# Altium footprint library CustomCase.PcbLib: 411 footprints (part 24 of 26)
Each footprint in its own frame and in the unit in brackets; x right, y up, seen from the top. Pads: shape width x height; smd on the part's side, far side on the other; paste and mask are expansions set on the pad; w line width, h text height; cw(c..) or ccw(c..) is an arc to the next point about the centre after c.
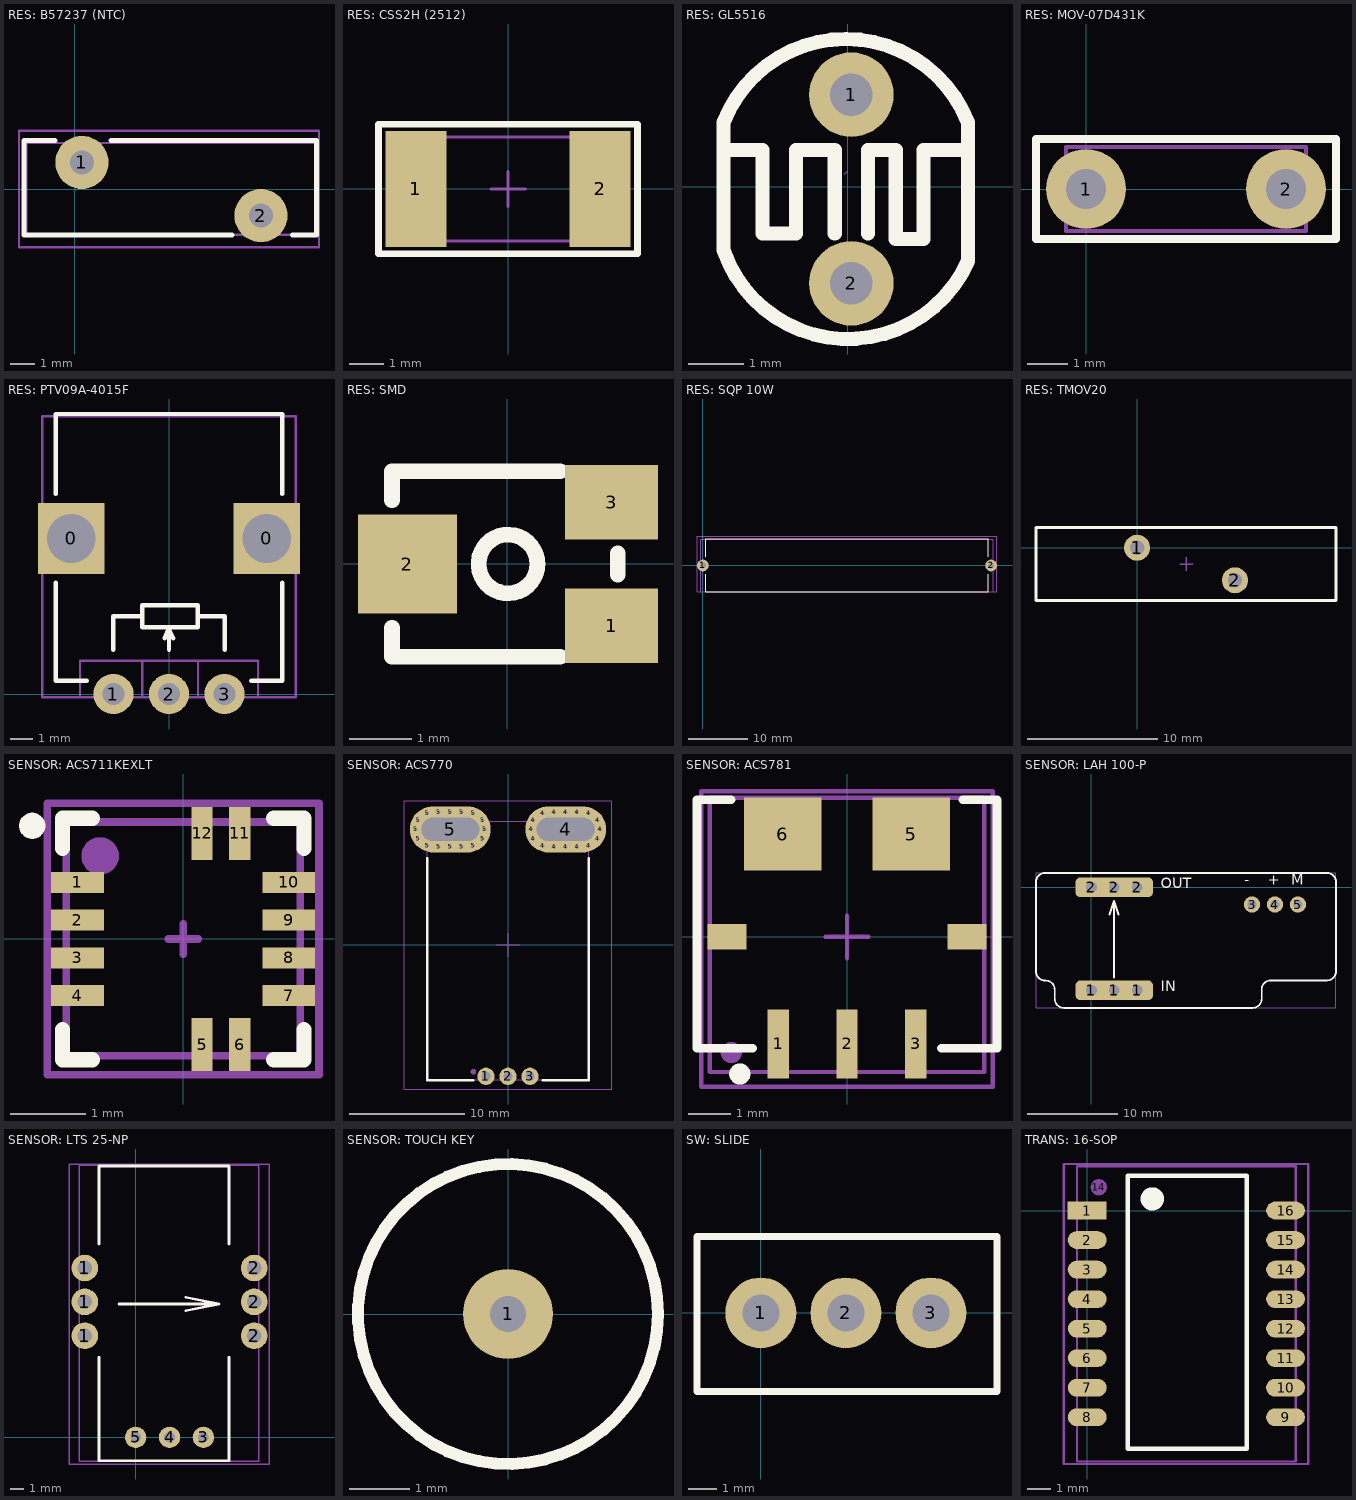
[diagram p23: the footprints below, top view; thin cyan lines are the x and y axes]

## RES: B57237 (NTC) [mm]
pads (2):
  round 2.2 hole 1: 1(0.3,1.1) 2(7.7,-1.1)
Top Overlay:
  lines w0.2: -0.8,2 -2.1,2 -2.1,-1.9 6.5,-1.9 ; 1.5,2 10,2 10,-1.9 9,-1.9
Top Assy:
  lines w0.1: -2,-1.9 10,-1.9 10,1.902 -2,1.902 -2,-1.9
Size Area:
  lines w0.1: -2.3,-2.4 -2.3,2.4 10.1,2.4 10.1,-2.4 -2.3,-2.4
3D body "User Library-S10K275.STEP": height 13, standoff -2.5, extent -2,-1.9 10,1.902

## RES: CSS2H (2512) [mm]
pads (2):
  rect 1.8x3.4 smd: 1(-2.7,0) 2(2.7,0)
Top Overlay:
  lines w0.2: -3.8,-1.9 3.8,-1.9 3.8,1.9 -3.8,1.9 -3.8,-1.9
Top Assy:
  lines w0.1: -3.175,-1.525 -3.175,1.525 3.175,1.525 3.175,-1.525 -3.175,-1.525
Size Area:
  lines w0.1: -0.5,0 0.5,0 ; 0,-0.5 0,0.5 ; -3.85,-1.9 -3.85,1.9 3.85,1.9 3.85,-1.9 -3.85,-1.9
3D body "CSS2H-2512.STEP": height 0.83, standoff 0, extent -3.175,-1.525 3.175,1.525

## RES: GL5516 [mil]
pads (2):
  round 60 hole 30: 1(2.44,65.44) 2(2.44,-68.42)
Top Overlay:
  lines w10: -88.16,-44.76 ccw(c0.04,-14.69) 85.14,-52.66 ; -88.16,45.74 cw(c-1.51,11.84) 85.14,45.74 ; -88.11,-44.8 -88.11,45.75 ; -88.11,26.07 -60.55,26.07 -60.55,-32.99 -36.93,-32.99 -36.93,26.07 -9.37,26.07 -9.37,-32.99 ; 14.25,-32.99 14.25,26.07 33.94,26.07 33.94,-36.93 53.62,-36.93 53.62,26.07 85.12,26.07 ; 85.12,-52.67 85.12,45.75
Size Area:
  lines w0.1: -2.5,9.03 -0.5,11.03

## RES: MOV-07D431K [mm]
pads (2):
  round 2 hole 1: 1(0,0) 2(5,0)
Top Overlay:
  lines w0.2: -1.25,-1.25 6.25,-1.25 6.25,1.25 -1.25,1.25 -1.25,-1.25
Top Assy:
  lines w0.1: -0.5,-1.05 5.5,-1.05 5.5,1.05 -0.5,1.05 -0.5,-1.05
Size Area:
  lines w0.1: -1.25,-1.25 -1.25,1.25 6.25,1.25 6.25,-1.25 -1.25,-1.25
3D body "User Library-Disc_CAP d6x3_5_5mm.STEP": height 8.1, standoff -2.02, extent -0.5,-1.05 5.5,1.05

## RES: PTV09A-4015F [mm]
pads (5):
  rect 3x3.2 hole 2.2 square: 0(-4.4,7) 0(4.4,7)
  round 1.8 hole 1: 1(-2.5,0) 2(0,0) 3(2.5,0)
Top Overlay:
  lines w0.2: -5.1,5 -5.1,0.6 -3.7,0.6 ; -5.1,9 -5.1,12.6 5.1,12.6 5.1,9 ; -2.5,2 -2.5,3.5 -1.2,3.5 ; -0.2,2.5 0,3 0,2 ; 0,2.9 0.2,2.5 ; 1.3,3.5 2.5,3.5 2.5,2 ; 3.7,0.6 5.1,0.6 5.1,5 ; -1.2,3.5 -1.2,3 1.3,3 1.3,4 -1.2,4 -1.2,3.5
Top Assy:
  lines w0.1: -4,-0.15 -4,1.5 4,1.5 4,-0.15 ; -2.5,2 -2.5,3.5 -1.2,3.5 ; -1.2,-0.15 -1.2,1.5 ; -0.2,2.5 0,3 ; 0,2 0,3 ; 0.2,2.5 0,3 ; 1.3,-0.15 1.3,1.5 ; 1.3,3.5 2.5,3.5 2.5,2 ; -1.2,3.5 -1.2,3 1.3,3 1.3,4 -1.2,4 -1.2,3.5 ; -5.7,-0.15 -5.7,12.5 5.7,12.5 5.7,-0.15 -5.7,-0.15
3D body "6666.STEP": height 15.05, standoff -3.94, extent -5.7,-0.15 5.7,12.5

## RES: SMD [mm]
pads (3):
  rect 1.5x1.2 smd: 1(1.685,-1.001) 3(1.685,0.999)
  rect 1.6x1.6 smd: 2(-1.615,-0.001)
Top Overlay:
  circle w0.254: c0.01,-0.001 r0.475
  lines w0.254: -0.065,1.499 -1.865,1.499 ; 0.854,-1.501 -0.065,-1.501 -1.865,-1.501 ; 0.854,1.499 -1.865,1.499 ; 1.785,-0.17 1.785,0.168 ; -1.865,-1.501 -1.865,-1.032 ; -1.865,-1.501 -1.865,-1.032 ; -1.865,-1.501 -1.865,-1.032 ; -1.865,1.03 -1.865,1.499 ; -1.865,1.03 -1.865,1.499 ; -1.865,1.03 -1.865,1.499
Size Area:
  circle w0.2: c2.135,-1.201 r0.1
3D body "3364w-1-101e.stp": height 1.01, standoff -0.03, extent -2.26,-1.901 2.24,1.899

## RES: SQP 10W [mm]
pads (2):
  round 2 hole 1: 1(0,0) 2(49,0)
Top Overlay:
  lines w0.2: 0.5,-1.5 0.5,-4.5 48.5,-4.5 48.5,-1.5 ; 0.5,1.5 0.5,4.5 48.5,4.5 48.5,1.5
Top Assy:
  lines w0.1: -0.4,4.4 -0.4,-4.5 49.4,-4.5 49.4,4.5 -0.4,4.5
Size Area:
  lines w0.1: -1,-4.5 -1,5 50,5 50,-4.5 -1,-4.5
3D body "User Library-SQP10AJB-1R8.STEP": height 10.55, standoff -4.04, extent -0.4,-4.5 49.4,4.5

## RES: TMOV20 [mm]
pads (2):
  round 2 hole 1.1: 1(0,0) 2(7.5,-2.5)
Top Overlay:
  lines w0.2: -7.75,-4.05 15.246,-4.05 15.246,1.55 -7.75,1.55 -7.75,-4.05
Top Assy:
  lines w0.1: -7.75,-4.05 15.246,-4.05 15.246,1.55 -7.75,1.55 -7.75,-4.05
Size Area:
  lines w0.1: 3.25,-1.25 4.25,-1.25 ; 3.75,-1.75 3.75,-0.75 ; -7.75,-4.05 15.246,-4.05 15.246,1.55 -7.75,1.55 -7.75,-4.05
3D body "User Library-Varistor 20mm.STEP": height 26.7, standoff -2.8, extent -7.75,-4.05 15.246,1.55

## SENSOR: ACS711KEXLT [mm]
pads (14):
  rect 0.7x0.28 smd: 1(-1.4,0.75) 2(-1.4,0.25) 3(-1.4,-0.25) 4(-1.4,-0.75) 7(1.4,-0.75) 8(1.4,-0.25) 9(1.4,0.25) 10(1.4,0.75)
  rect 0.28x0.7 smd: 5(0.25,-1.4) 6(0.75,-1.4) 11(0.75,1.4) 12(0.25,1.4)
  round 0.35 on Top Overlay: ""(-2,1.5)
  round 0.5 on Mech1: ""(-1.1,1.1)
Top Overlay:
  lines w0.2: -1.6,-1.2 -1.6,-1.6 -1.2,-1.6 ; -1.6,1.2 -1.6,1.6 -1.2,1.6 ; 1.2,-1.6 1.6,-1.6 1.6,-1.2 ; 1.2,1.6 1.6,1.6 1.6,1.2
Top Assy:
  lines w0.1: -1.55,-1.55 1.55,-1.55 1.55,1.55 -1.55,1.55 -1.55,-1.55
Size Area:
  lines w0.1: -0.2,0 0.2,0 ; 0,-0.2 0,0.2 ; -1.8,-1.8 -1.8,1.8 1.8,1.8 1.8,-1.8 -1.8,-1.8
3D body "User Library-QFN-16.STEP": height 0.9, standoff 0, extent -1.501,-1.501 1.501,1.501

## SENSOR: ACS770 [mm]
pads (38):
  round 1.5 hole 0.8: 1(-1.91,-11.4) 2(0,-11.4) 3(1.91,-11.4)
  round 0.5 on Mech1: 4(-3,-11)
  round 0.7 hole 0.3: 4(2,10) 4(2.2,9.2) 4(2.2,10.8) 4(3,8.6) 4(3,11.4) 4(4,8.5) 4(4,11.5) 4(5,8.5) 4(5,11.5) 4(6,8.5) 4(6,11.5) 4(7,8.6) 4(7,11.4) 4(7.8,9.2) 4(7.8,10.8) 4(8,10) 5(-8,10) 5(-7.8,9.2) 5(-7.8,10.8) 5(-7,8.6) 5(-7,11.4) 5(-6,8.5) 5(-6,11.5) 5(-5,8.5) 5(-5,11.5) 5(-4,8.5) 5(-4,11.5) 5(-3,8.6) 5(-3,11.4) 5(-2.2,9.2) 5(-2.2,10.8) 5(-2,10)
  oval 7x4 hole 2 slot 5 at 0 deg: 4(5,10) 5(-5,10)
Top Overlay:
  lines w0.2: -7,7.5 -7,-11.75 -3,-11.75 ; 3,-11.75 7,-11.75 7,7.5
Top Assy:
  lines w0.1: -7,-11.705 7,-11.705 7,10.705 -7,10.705 -7,-11.705
Size Area:
  lines w0.1: -1,0 1,0 ; 0,-1 0,1 ; -9,-12.5 9,-12.5 ; -9,-12.5 9,-12.5 ; -9,-12.5 -9,12.5 9,12.5 9,-12.5
3D body "User Library-ACS758xCB-PFF.STEP": height 7.5, standoff -2.98, extent -7,-11.705 7,10.705

## SENSOR: ACS781 [mm]
pads (9):
  rect 0.5x1.6 smd: 1(-1.6,-2.5) 2(0,-2.5) 3(1.6,-2.5)
  rect 1.8x1.7 smd: 5(1.5,2.4) 6(-1.5,2.4)
  rect 0.9x0.6 smd: ""(-2.8,0) ""(2.8,0)
  round 0.5 on Mech1: ""(-2.7,-2.7)
  round 0.5 on Top Overlay: ""(-2.5,-3.2)
Top Overlay:
  lines w0.2: -2.7,3.2 -3.5,3.2 -3.5,-2.6 -2.2,-2.6 ; 2.2,-2.6 3.5,-2.6 3.5,3.2 2.7,3.2
Top Assy:
  lines w0.1: -3.2,-3.154 3.2,-3.154 3.2,3.246 -3.2,3.246 -3.2,-3.154
Size Area:
  lines w0.1: -0.5,0 0.5,0 ; 0,-0.5 0,0.5 ; -3.4,-3.5 -3.4,3.4 3.4,3.4 3.4,-3.5 -3.4,-3.5
3D body "User Library-7-Pin PSOF Package.STEP": height 1.46, standoff -0.02, extent -3.2,-3.154 3.2,3.246

## SENSOR: LAH 100-P [mm]
pads (9):
  rrect50% 3.5x2.2 hole 1.2 square: 1(0,-11.4) 1(2.54,-11.4) 1(5.08,-11.4) 2(0,0) 2(2.54,0) 2(5.08,0)
  round 1.8 hole 1: 3(17.78,-1.905) 4(20.32,-1.905) 5(22.86,-1.905)
Top Overlay:
  lines w0.2: -6.125,0.595 cw(c-5.125,0.595) -5.125,1.595 26.075,1.595 cw(c26.075,0.595) 27.075,0.595 27.075,-9.302 ; -6.125,0.6 -6.125,-9.325 ccw(c-5.125,-9.325) -5.125,-10.325 -5.05,-10.325 cw(c-5.05,-11.325) -4.05,-11.325 -4.05,-12.345 ccw(c-3.05,-12.345) -3.05,-13.345 17.85,-13.345 ccw(c17.85,-12.345) 18.85,-12.345 18.85,-11.3 cw(c19.85,-11.3) 19.85,-10.3 26.075,-10.3 ccw(c26.075,-9.3) 27.075,-9.3 ; 2,-3 2.5,-1.5 ; 2.5,-10 2.5,-1.5 ; 3,-3 2.5,-1.5
  text "M" at 22.1,-0.1 h2
  text "+" at 19.5,-0.1 h2
  text "-" at 16.9,-0.1 h2
  text "OUT" at 7.7,-0.5 h2
  text "IN" at 7.7,-11.9 h2
Top Assy:
  lines w0.1: -6.125,-13.345 27.075,-13.345 27.075,1.595 -6.125,1.595 -6.125,-13.345
Size Area:
  lines w0.1: -6.125,-13.345 27.075,-13.345 27.075,1.595 -6.125,1.595 -6.125,-13.345
3D body "TransCurrent v4.step": height 20.15, standoff -4.45, extent -6.125,-13.345 27.075,1.595

## SENSOR: LTS 25-NP [mm]
pads (9):
  round 2 hole 1.1: 1(-3.81,7.62) 1(-3.81,10.16) 1(-3.81,12.7) 2(8.89,7.62) 2(8.89,10.16) 2(8.89,12.7)
  round 1.6 hole 0.8: 3(5.08,0) 4(2.54,0) 5(0,0)
Top Overlay:
  lines w0.2: -2.75,6 -2.75,-1.75 7,-1.75 7,6 ; -2.75,14.5 -2.75,20.35 7,20.35 7,14.5 ; -1.25,10 6.25,10 ; 3.75,9.5 6.25,10 ; 3.75,10.5 6.25,10
Top Assy:
  lines w0.1: -4.25,-1.8 9.25,-1.8 9.25,20.4 -4.25,20.4 -4.25,-1.8
Size Area:
  lines w0.1: -5,-2 10,-2 10,20.5 -5,20.5 -5,-2
3D body "User Library-LTS6_NP.STEP": height 24, standoff -3.5, extent -4.25,-1.8 9.25,20.4

## SENSOR: TOUCH KEY [mm]
pads (1):
  round 1.5 hole 0.6: 1(0,0)
Top Overlay:
  circle w0.2: c0,0 r2.5
3D body "Sensor_Spring_XL-2258.STEP": height 6.22, standoff -2.8, extent -4,-4 4,4

## SW: SLIDE [mm]
pads (3):
  round 2.5 hole 1.3: 1(0,0) 2(3,0) 3(6,0)
Top Overlay:
  lines w0.254: -2.254,-2.769 8.331,-2.769 8.331,2.692 -2.254,2.692 -2.254,-2.769

## TRANS: 16-SOP [mm]
pads (17):
  rect 1.67x0.76 smd: 1(0,0)
  oval 1.67x0.76 smd: 2(0,-1.27) 3(0,-2.54) 4(0,-3.81) 5(0,-5.08) 6(0,-6.35) 7(0,-7.62) 8(0,-8.89) 9(8.53,-8.89) 10(8.53,-7.62) 11(8.53,-6.35) 12(8.53,-5.08) 13(8.53,-3.81) 14(8.53,-2.54) 15(8.53,-1.27) 16(8.53,0)
  round 0.7 on Mech1: 14(0.5,1)
Top Overlay:
  circle w0.6: c2.8,0.5 r0.2
  lines w0.2: 4.583,1.5 6.86,1.5 6.86,-10.25 1.75,-10.25 1.75,1.5 6,1.5
Top Assy:
  lines w0.1: -0.435,-10.795 8.965,-10.795 8.965,1.905 -0.435,1.905 -0.435,-10.795
Size Area:
  lines w0.1: -1,-10.9 -1,2 9.5,2 9.5,-10.9 -1,-10.9
3D body "User Library-smt4.step": height 5.1, standoff 0, extent -0.435,-10.795 8.965,1.905